# Altium schematic symbol library 调理电路板.SCHLIB: 432 symbols (part 3 of 8)
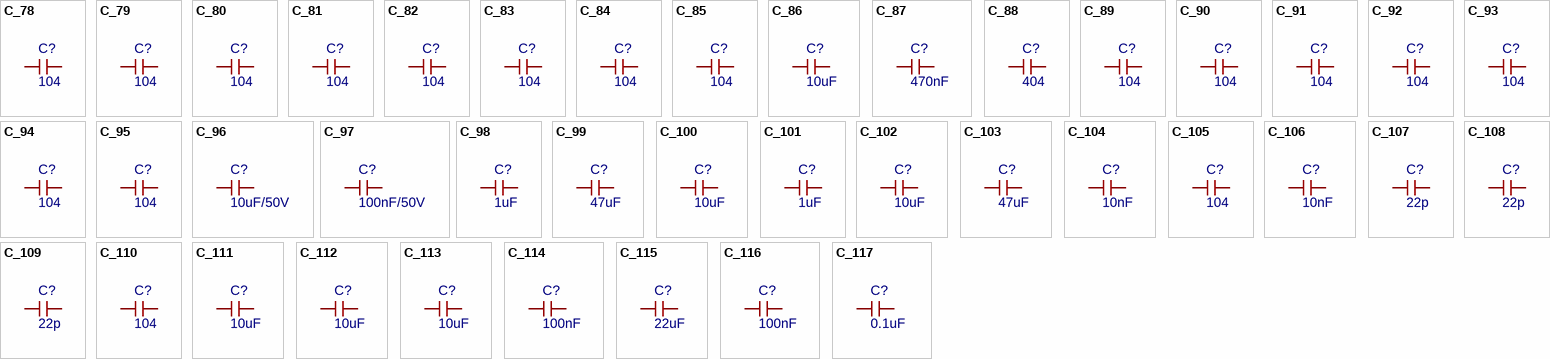
[diagram p12: symbols C_78 to C_117]

## C_107
designator C?, comment 22p
贴片电容; Device: C; BOM名称: 无极性贴片电容; 淘宝ID: 封装库来自淘宝 ID：黄晶宝石; Origin Footprint: C 0201_L; OriginFootprint 2: C 0402_L; OriginFootprint 3: C 0805_L; OriginFootprint 4: C 1206_L; OriginFootprint 5: C 1210_L; OriginFootprint 6: C 1808_L; OriginFootprint 7: C 1812_L; OriginFootprint 8: C 1825_L; OriginFootprint 9: C 2225_L; OriginFootprint 10: C 0201_M; OriginFootprint 11: C 0402_M; OriginFootprint 12: C 0603_M; OriginFootprint 13: C 0805_M; OriginFootprint 14: C 1206_M; OriginFootprint 15: C 1210_M; OriginFootprint 16: C 1808_M; OriginFootprint 17: C 1812_M; OriginFootprint 18: C 1825_M; OriginFootprint 19: C 2225_M; AddInBom: yes; OriginModelName: C 0603; 联系售后，技术支持: https://shop463601444.taobao.com; 唯一出售店铺网址: https://shop463601444.taobao.com; DesignItemID: C; LibraryName: 0.1 - 电阻-电容-电感; Symbol: C; FootprintName: C 0603_L
footprint C 0603_L
pins: 1, 2

## C_108
designator C?, comment 22p
贴片电容; Device: C; BOM名称: 无极性贴片电容; 淘宝ID: 封装库来自淘宝 ID：黄晶宝石; Origin Footprint: C 0201_L; OriginFootprint 2: C 0402_L; OriginFootprint 3: C 0805_L; OriginFootprint 4: C 1206_L; OriginFootprint 5: C 1210_L; OriginFootprint 6: C 1808_L; OriginFootprint 7: C 1812_L; OriginFootprint 8: C 1825_L; OriginFootprint 9: C 2225_L; OriginFootprint 10: C 0201_M; OriginFootprint 11: C 0402_M; OriginFootprint 12: C 0603_M; OriginFootprint 13: C 0805_M; OriginFootprint 14: C 1206_M; OriginFootprint 15: C 1210_M; OriginFootprint 16: C 1808_M; OriginFootprint 17: C 1812_M; OriginFootprint 18: C 1825_M; OriginFootprint 19: C 2225_M; UniqueId: e499cbaf5d6886da; AddInBom: yes; OriginModelName: C 0603; 联系售后，技术支持: https://shop463601444.taobao.com; 唯一出售店铺网址: https://shop463601444.taobao.com; DesignItemID: C; LibraryName: 0.1 - 电阻-电容-电感; SymbolName: C; FootprintName: C 0603_L
footprint C 0603_L
pins: 1, 2

## C_109
designator C?, comment 22p
贴片电容; Device: C; BOM名称: 无极性贴片电容; 淘宝ID: 封装库来自淘宝 ID：黄晶宝石; Origin Footprint: C 0201_L; OriginFootprint 2: C 0402_L; OriginFootprint 3: C 0805_L; OriginFootprint 4: C 1206_L; OriginFootprint 5: C 1210_L; OriginFootprint 6: C 1808_L; OriginFootprint 7: C 1812_L; OriginFootprint 8: C 1825_L; OriginFootprint 9: C 2225_L; OriginFootprint 10: C 0201_M; OriginFootprint 11: C 0402_M; OriginFootprint 12: C 0603_M; OriginFootprint 13: C 0805_M; OriginFootprint 14: C 1206_M; OriginFootprint 15: C 1210_M; OriginFootprint 16: C 1808_M; OriginFootprint 17: C 1812_M; OriginFootprint 18: C 1825_M; OriginFootprint 19: C 2225_M; UniqueId: 44783e19f4d5cd3c; AddInBom: yes; OriginModelName: C 0603; 联系售后，技术支持: https://shop463601444.taobao.com; 唯一出售店铺网址: https://shop463601444.taobao.com; DesignItemID: C; LibraryName: 0.1 - 电阻-电容-电感; SymbolName: C; FootprintName: C 0603_L
footprint C 0603_L
pins: 1, 2

## C_110
designator C?, comment 104
贴片电容; Device: C; BOM名称: 无极性贴片电容; 淘宝ID: 封装库来自淘宝 ID：黄晶宝石; Origin Footprint: C 0201_L; OriginFootprint 2: C 0402_L; OriginFootprint 3: C 0805_L; OriginFootprint 4: C 1206_L; OriginFootprint 5: C 1210_L; OriginFootprint 6: C 1808_L; OriginFootprint 7: C 1812_L; OriginFootprint 8: C 1825_L; OriginFootprint 9: C 2225_L; OriginFootprint 10: C 0201_M; OriginFootprint 11: C 0402_M; OriginFootprint 12: C 0603_M; OriginFootprint 13: C 0805_M; OriginFootprint 14: C 1206_M; OriginFootprint 15: C 1210_M; OriginFootprint 16: C 1808_M; OriginFootprint 17: C 1812_M; OriginFootprint 18: C 1825_M; OriginFootprint 19: C 2225_M; AddInBom: yes; OriginModelName: C 0603; 联系售后，技术支持: https://shop463601444.taobao.com; 唯一出售店铺网址: https://shop463601444.taobao.com; DesignItemID: C; LibraryName: 0.1 - 电阻-电容-电感; Symbol: C; FootprintName: C 0603_L
footprint C 0603_L
pins: 1, 2

## C_111
designator C?, comment 10uF
贴片电容; Device: C; BOM名称: 无极性贴片电容; 淘宝ID: 封装库来自淘宝 ID：黄晶宝石; Origin Footprint: C 0201_L; OriginFootprint 2: C 0402_L; OriginFootprint 3: C 0805_L; OriginFootprint 4: C 1206_L; OriginFootprint 5: C 1210_L; OriginFootprint 6: C 1808_L; OriginFootprint 7: C 1812_L; OriginFootprint 8: C 1825_L; OriginFootprint 9: C 2225_L; OriginFootprint 10: C 0201_M; OriginFootprint 11: C 0402_M; OriginFootprint 12: C 0603_M; OriginFootprint 13: C 0805_M; OriginFootprint 14: C 1206_M; OriginFootprint 15: C 1210_M; OriginFootprint 16: C 1808_M; OriginFootprint 17: C 1812_M; OriginFootprint 18: C 1825_M; OriginFootprint 19: C 2225_M; UniqueId: 9f98958e25b8e40a; AddInBom: yes; OriginModelName: C 0603; 联系售后，技术支持: https://shop463601444.taobao.com; 唯一出售店铺网址: https://shop463601444.taobao.com; DesignItemID: C; LibraryName: 0.1 - 电阻-电容-电感; SymbolName: C; FootprintName: C 0603_L
footprint C 0603_L
pins: 1, 2

## C_112
designator C?, comment 10uF
贴片电容; Device: C; BOM名称: 无极性贴片电容; 淘宝ID: 封装库来自淘宝 ID：黄晶宝石; Origin Footprint: C 0201_L; OriginFootprint 2: C 0402_L; OriginFootprint 3: C 0805_L; OriginFootprint 4: C 1206_L; OriginFootprint 5: C 1210_L; OriginFootprint 6: C 1808_L; OriginFootprint 7: C 1812_L; OriginFootprint 8: C 1825_L; OriginFootprint 9: C 2225_L; OriginFootprint 10: C 0201_M; OriginFootprint 11: C 0402_M; OriginFootprint 12: C 0603_M; OriginFootprint 13: C 0805_M; OriginFootprint 14: C 1206_M; OriginFootprint 15: C 1210_M; OriginFootprint 16: C 1808_M; OriginFootprint 17: C 1812_M; OriginFootprint 18: C 1825_M; OriginFootprint 19: C 2225_M; UniqueId: a1d489a10d49980a; AddInBom: yes; OriginModelName: C 0603; 联系售后，技术支持: https://shop463601444.taobao.com; 唯一出售店铺网址: https://shop463601444.taobao.com; DesignItemID: C; LibraryName: 0.1 - 电阻-电容-电感; SymbolName: C; FootprintName: C 0603_L
footprint C 0603_L
pins: 1, 2

## C_113
designator C?, comment 10uF
贴片电容; Device: C; BOM名称: 无极性贴片电容; 淘宝ID: 封装库来自淘宝 ID：黄晶宝石; Origin Footprint: C 0201_L; OriginFootprint 2: C 0402_L; OriginFootprint 3: C 0805_L; OriginFootprint 4: C 1206_L; OriginFootprint 5: C 1210_L; OriginFootprint 6: C 1808_L; OriginFootprint 7: C 1812_L; OriginFootprint 8: C 1825_L; OriginFootprint 9: C 2225_L; OriginFootprint 10: C 0201_M; OriginFootprint 11: C 0402_M; OriginFootprint 12: C 0603_M; OriginFootprint 13: C 0805_M; OriginFootprint 14: C 1206_M; OriginFootprint 15: C 1210_M; OriginFootprint 16: C 1808_M; OriginFootprint 17: C 1812_M; OriginFootprint 18: C 1825_M; OriginFootprint 19: C 2225_M; UniqueId: 824abd34b9a494cf; AddInBom: yes; OriginModelName: C 0603; 联系售后，技术支持: https://shop463601444.taobao.com; 唯一出售店铺网址: https://shop463601444.taobao.com; DesignItemID: C; LibraryName: 0.1 - 电阻-电容-电感; SymbolName: C; FootprintName: C 0603_L
footprint C 0603_L
pins: 1, 2

## C_114
designator C?, comment 100nF
贴片电容; Device: C; BOM名称: 无极性贴片电容; 淘宝ID: 封装库来自淘宝 ID：黄晶宝石; Origin Footprint: C 0201_L; OriginFootprint 2: C 0402_L; OriginFootprint 3: C 0805_L; OriginFootprint 4: C 1206_L; OriginFootprint 5: C 1210_L; OriginFootprint 6: C 1808_L; OriginFootprint 7: C 1812_L; OriginFootprint 8: C 1825_L; OriginFootprint 9: C 2225_L; OriginFootprint 10: C 0201_M; OriginFootprint 11: C 0402_M; OriginFootprint 12: C 0603_M; OriginFootprint 13: C 0805_M; OriginFootprint 14: C 1206_M; OriginFootprint 15: C 1210_M; OriginFootprint 16: C 1808_M; OriginFootprint 17: C 1812_M; OriginFootprint 18: C 1825_M; OriginFootprint 19: C 2225_M; UniqueId: 3b64af110c352242; AddInBom: yes; OriginModelName: C 0603; 联系售后，技术支持: https://shop463601444.taobao.com; 唯一出售店铺网址: https://shop463601444.taobao.com; DesignItemID: C; LibraryName: 0.1 - 电阻-电容-电感; SymbolName: C; FootprintName: C 0603_L
footprint C 0603_L
pins: 1, 2

## C_115
designator C?, comment 22uF
贴片电容; Device: C; BOM名称: 无极性贴片电容; 淘宝ID: 封装库来自淘宝 ID：黄晶宝石; Origin Footprint: C 0201_L; OriginFootprint 2: C 0402_L; OriginFootprint 3: C 0805_L; OriginFootprint 4: C 1206_L; OriginFootprint 5: C 1210_L; OriginFootprint 6: C 1808_L; OriginFootprint 7: C 1812_L; OriginFootprint 8: C 1825_L; OriginFootprint 9: C 2225_L; OriginFootprint 10: C 0201_M; OriginFootprint 11: C 0402_M; OriginFootprint 12: C 0603_M; OriginFootprint 13: C 0805_M; OriginFootprint 14: C 1206_M; OriginFootprint 15: C 1210_M; OriginFootprint 16: C 1808_M; OriginFootprint 17: C 1812_M; OriginFootprint 18: C 1825_M; OriginFootprint 19: C 2225_M; UniqueId: 6fbf0abcc055cd01; AddInBom: yes; OriginModelName: C 0603; 联系售后，技术支持: https://shop463601444.taobao.com; 唯一出售店铺网址: https://shop463601444.taobao.com; DesignItemID: C; LibraryName: 0.1 - 电阻-电容-电感; SymbolName: C; FootprintName: C 0603_L
footprint C 0603_L
pins: 1, 2

## C_116
designator C?, comment 100nF
贴片电容; Device: C; BOM名称: 无极性贴片电容; 淘宝ID: 封装库来自淘宝 ID：黄晶宝石; Origin Footprint: C 0201_L; OriginFootprint 2: C 0402_L; OriginFootprint 3: C 0805_L; OriginFootprint 4: C 1206_L; OriginFootprint 5: C 1210_L; OriginFootprint 6: C 1808_L; OriginFootprint 7: C 1812_L; OriginFootprint 8: C 1825_L; OriginFootprint 9: C 2225_L; OriginFootprint 10: C 0201_M; OriginFootprint 11: C 0402_M; OriginFootprint 12: C 0603_M; OriginFootprint 13: C 0805_M; OriginFootprint 14: C 1206_M; OriginFootprint 15: C 1210_M; OriginFootprint 16: C 1808_M; OriginFootprint 17: C 1812_M; OriginFootprint 18: C 1825_M; OriginFootprint 19: C 2225_M; UniqueId: 0051e2e57f65e1ac; AddInBom: yes; OriginModelName: C 0603; 联系售后，技术支持: https://shop463601444.taobao.com; 唯一出售店铺网址: https://shop463601444.taobao.com; DesignItemID: C; LibraryName: 0.1 - 电阻-电容-电感; SymbolName: C; FootprintName: C 0603_L
footprint C 0603_L
pins: 1, 2

## C_117
designator C?, comment 0.1uF
贴片电容; Device: C; BOM名称: 无极性贴片电容; 淘宝ID: 封装库来自淘宝 ID：黄晶宝石; Origin Footprint: C 0201_L; OriginFootprint 2: C 0402_L; OriginFootprint 3: C 0805_L; OriginFootprint 4: C 1206_L; OriginFootprint 5: C 1210_L; OriginFootprint 6: C 1808_L; OriginFootprint 7: C 1812_L; OriginFootprint 8: C 1825_L; OriginFootprint 9: C 2225_L; OriginFootprint 10: C 0201_M; OriginFootprint 11: C 0402_M; OriginFootprint 12: C 0603_M; OriginFootprint 13: C 0805_M; OriginFootprint 14: C 1206_M; OriginFootprint 15: C 1210_M; OriginFootprint 16: C 1808_M; OriginFootprint 17: C 1812_M; OriginFootprint 18: C 1825_M; OriginFootprint 19: C 2225_M; UniqueId: c0e8232d23165c04; AddInBom: yes; OriginModelName: C 0603; 联系售后，技术支持: https://shop463601444.taobao.com; 唯一出售店铺网址: https://shop463601444.taobao.com; DesignItemID: C; LibraryName: 0.1 - 电阻-电容-电感; SymbolName: C; FootprintName: C 0603_L
footprint C 0603_L
pins: 1, 2

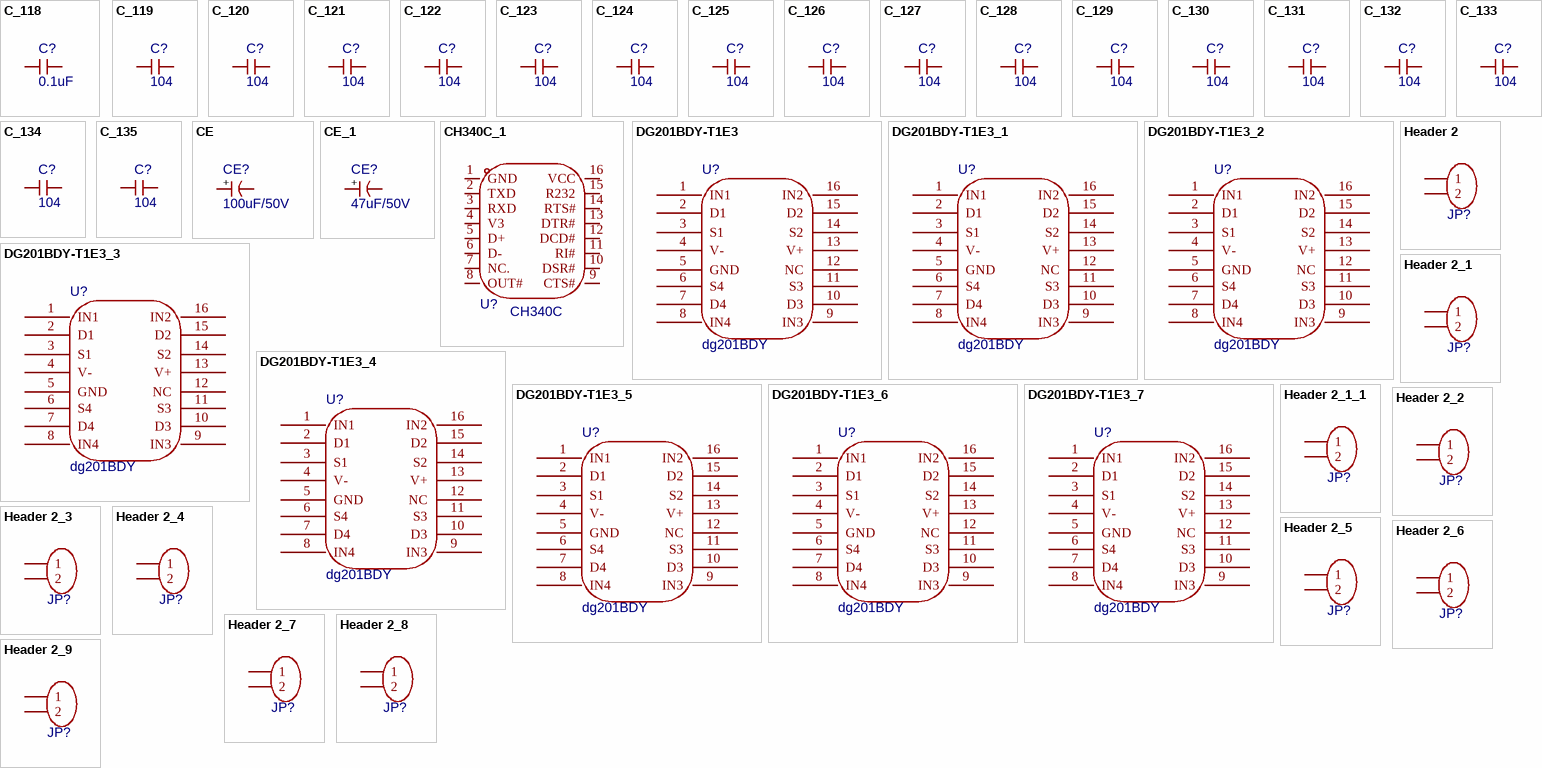
[diagram p3: symbols C_118 to Header 2_9]

## C_118
designator C?, comment 0.1uF
贴片电容; Device: C; BOM名称: 无极性贴片电容; 淘宝ID: 封装库来自淘宝 ID：黄晶宝石; Origin Footprint: C 0201_L; OriginFootprint 2: C 0402_L; OriginFootprint 3: C 0805_L; OriginFootprint 4: C 1206_L; OriginFootprint 5: C 1210_L; OriginFootprint 6: C 1808_L; OriginFootprint 7: C 1812_L; OriginFootprint 8: C 1825_L; OriginFootprint 9: C 2225_L; OriginFootprint 10: C 0201_M; OriginFootprint 11: C 0402_M; OriginFootprint 12: C 0603_M; OriginFootprint 13: C 0805_M; OriginFootprint 14: C 1206_M; OriginFootprint 15: C 1210_M; OriginFootprint 16: C 1808_M; OriginFootprint 17: C 1812_M; OriginFootprint 18: C 1825_M; OriginFootprint 19: C 2225_M; UniqueId: c782c298b34552c5; AddInBom: yes; OriginModelName: C 0603; 联系售后，技术支持: https://shop463601444.taobao.com; 唯一出售店铺网址: https://shop463601444.taobao.com; DesignItemID: C; LibraryName: 0.1 - 电阻-电容-电感; SymbolName: C; FootprintName: C 0603_L
footprint C 0603_L
pins: 1, 2

## C_119
designator C?, comment 104
贴片电容; Device: C; BOM名称: 无极性贴片电容; 淘宝ID: 封装库来自淘宝 ID：黄晶宝石; Origin Footprint: C 0201_L; OriginFootprint 2: C 0402_L; OriginFootprint 3: C 0805_L; OriginFootprint 4: C 1206_L; OriginFootprint 5: C 1210_L; OriginFootprint 6: C 1808_L; OriginFootprint 7: C 1812_L; OriginFootprint 8: C 1825_L; OriginFootprint 9: C 2225_L; OriginFootprint 10: C 0201_M; OriginFootprint 11: C 0402_M; OriginFootprint 12: C 0603_M; OriginFootprint 13: C 0805_M; OriginFootprint 14: C 1206_M; OriginFootprint 15: C 1210_M; OriginFootprint 16: C 1808_M; OriginFootprint 17: C 1812_M; OriginFootprint 18: C 1825_M; OriginFootprint 19: C 2225_M; UniqueId: 09d5d64189419707; AddInBom: yes; OriginModelName: C 0603; 联系售后，技术支持: https://shop463601444.taobao.com; 唯一出售店铺网址: https://shop463601444.taobao.com; DesignItemID: C; LibraryName: 0.1 - 电阻-电容-电感; SymbolName: C; FootprintName: C 0603_L
footprint C 0603_L
pins: 1, 2

## C_120
designator C?, comment 104
贴片电容; Device: C; BOM名称: 无极性贴片电容; 淘宝ID: 封装库来自淘宝 ID：黄晶宝石; Origin Footprint: C 0201_L; OriginFootprint 2: C 0402_L; OriginFootprint 3: C 0805_L; OriginFootprint 4: C 1206_L; OriginFootprint 5: C 1210_L; OriginFootprint 6: C 1808_L; OriginFootprint 7: C 1812_L; OriginFootprint 8: C 1825_L; OriginFootprint 9: C 2225_L; OriginFootprint 10: C 0201_M; OriginFootprint 11: C 0402_M; OriginFootprint 12: C 0603_M; OriginFootprint 13: C 0805_M; OriginFootprint 14: C 1206_M; OriginFootprint 15: C 1210_M; OriginFootprint 16: C 1808_M; OriginFootprint 17: C 1812_M; OriginFootprint 18: C 1825_M; OriginFootprint 19: C 2225_M; UniqueId: a4fa6dbd8546cc48; AddInBom: yes; OriginModelName: C 0603; 联系售后，技术支持: https://shop463601444.taobao.com; 唯一出售店铺网址: https://shop463601444.taobao.com; DesignItemID: C; LibraryName: 0.1 - 电阻-电容-电感; SymbolName: C; FootprintName: C 0603_L
footprint C 0603_L
pins: 1, 2

## C_121
designator C?, comment 104
贴片电容; Device: C; BOM名称: 无极性贴片电容; 淘宝ID: 封装库来自淘宝 ID：黄晶宝石; Origin Footprint: C 0201_L; OriginFootprint 2: C 0402_L; OriginFootprint 3: C 0805_L; OriginFootprint 4: C 1206_L; OriginFootprint 5: C 1210_L; OriginFootprint 6: C 1808_L; OriginFootprint 7: C 1812_L; OriginFootprint 8: C 1825_L; OriginFootprint 9: C 2225_L; OriginFootprint 10: C 0201_M; OriginFootprint 11: C 0402_M; OriginFootprint 12: C 0603_M; OriginFootprint 13: C 0805_M; OriginFootprint 14: C 1206_M; OriginFootprint 15: C 1210_M; OriginFootprint 16: C 1808_M; OriginFootprint 17: C 1812_M; OriginFootprint 18: C 1825_M; OriginFootprint 19: C 2225_M; UniqueId: 5298304991856aac; AddInBom: yes; OriginModelName: C 0603; 联系售后，技术支持: https://shop463601444.taobao.com; 唯一出售店铺网址: https://shop463601444.taobao.com; DesignItemID: C; LibraryName: 0.1 - 电阻-电容-电感; SymbolName: C; FootprintName: C 0603_L
footprint C 0603_L
pins: 1, 2

## C_122
designator C?, comment 104
贴片电容; Device: C; BOM名称: 无极性贴片电容; 淘宝ID: 封装库来自淘宝 ID：黄晶宝石; Origin Footprint: C 0201_L; OriginFootprint 2: C 0402_L; OriginFootprint 3: C 0805_L; OriginFootprint 4: C 1206_L; OriginFootprint 5: C 1210_L; OriginFootprint 6: C 1808_L; OriginFootprint 7: C 1812_L; OriginFootprint 8: C 1825_L; OriginFootprint 9: C 2225_L; OriginFootprint 10: C 0201_M; OriginFootprint 11: C 0402_M; OriginFootprint 12: C 0603_M; OriginFootprint 13: C 0805_M; OriginFootprint 14: C 1206_M; OriginFootprint 15: C 1210_M; OriginFootprint 16: C 1808_M; OriginFootprint 17: C 1812_M; OriginFootprint 18: C 1825_M; OriginFootprint 19: C 2225_M; UniqueId: cd91d26fa4917fbf; AddInBom: yes; OriginModelName: C 0603; 联系售后，技术支持: https://shop463601444.taobao.com; 唯一出售店铺网址: https://shop463601444.taobao.com; DesignItemID: C; LibraryName: 0.1 - 电阻-电容-电感; SymbolName: C; FootprintName: C 0603_L
footprint C 0603_L
pins: 1, 2

## C_123
designator C?, comment 104
贴片电容; Device: C; BOM名称: 无极性贴片电容; 淘宝ID: 封装库来自淘宝 ID：黄晶宝石; Origin Footprint: C 0201_L; OriginFootprint 2: C 0402_L; OriginFootprint 3: C 0805_L; OriginFootprint 4: C 1206_L; OriginFootprint 5: C 1210_L; OriginFootprint 6: C 1808_L; OriginFootprint 7: C 1812_L; OriginFootprint 8: C 1825_L; OriginFootprint 9: C 2225_L; OriginFootprint 10: C 0201_M; OriginFootprint 11: C 0402_M; OriginFootprint 12: C 0603_M; OriginFootprint 13: C 0805_M; OriginFootprint 14: C 1206_M; OriginFootprint 15: C 1210_M; OriginFootprint 16: C 1808_M; OriginFootprint 17: C 1812_M; OriginFootprint 18: C 1825_M; OriginFootprint 19: C 2225_M; UniqueId: e068690e94c157bc; AddInBom: yes; OriginModelName: C 0603; 联系售后，技术支持: https://shop463601444.taobao.com; 唯一出售店铺网址: https://shop463601444.taobao.com; DesignItemID: C; LibraryName: 0.1 - 电阻-电容-电感; SymbolName: C; FootprintName: C 0603_L
footprint C 0603_L
pins: 1, 2

## C_124
designator C?, comment 104
贴片电容; Device: C; BOM名称: 无极性贴片电容; 淘宝ID: 封装库来自淘宝 ID：黄晶宝石; Origin Footprint: C 0201_L; OriginFootprint 2: C 0402_L; OriginFootprint 3: C 0805_L; OriginFootprint 4: C 1206_L; OriginFootprint 5: C 1210_L; OriginFootprint 6: C 1808_L; OriginFootprint 7: C 1812_L; OriginFootprint 8: C 1825_L; OriginFootprint 9: C 2225_L; OriginFootprint 10: C 0201_M; OriginFootprint 11: C 0402_M; OriginFootprint 12: C 0603_M; OriginFootprint 13: C 0805_M; OriginFootprint 14: C 1206_M; OriginFootprint 15: C 1210_M; OriginFootprint 16: C 1808_M; OriginFootprint 17: C 1812_M; OriginFootprint 18: C 1825_M; OriginFootprint 19: C 2225_M; UniqueId: 60b913fe2234996d; AddInBom: yes; OriginModelName: C 0603; 联系售后，技术支持: https://shop463601444.taobao.com; 唯一出售店铺网址: https://shop463601444.taobao.com; DesignItemID: C; LibraryName: 0.1 - 电阻-电容-电感; SymbolName: C; FootprintName: C 0603_L
footprint C 0603_L
pins: 1, 2

## C_125
designator C?, comment 104
贴片电容; Device: C; BOM名称: 无极性贴片电容; 淘宝ID: 封装库来自淘宝 ID：黄晶宝石; Origin Footprint: C 0201_L; OriginFootprint 2: C 0402_L; OriginFootprint 3: C 0805_L; OriginFootprint 4: C 1206_L; OriginFootprint 5: C 1210_L; OriginFootprint 6: C 1808_L; OriginFootprint 7: C 1812_L; OriginFootprint 8: C 1825_L; OriginFootprint 9: C 2225_L; OriginFootprint 10: C 0201_M; OriginFootprint 11: C 0402_M; OriginFootprint 12: C 0603_M; OriginFootprint 13: C 0805_M; OriginFootprint 14: C 1206_M; OriginFootprint 15: C 1210_M; OriginFootprint 16: C 1808_M; OriginFootprint 17: C 1812_M; OriginFootprint 18: C 1825_M; OriginFootprint 19: C 2225_M; UniqueId: 485846f0059d8f41; AddInBom: yes; OriginModelName: C 0603; 联系售后，技术支持: https://shop463601444.taobao.com; 唯一出售店铺网址: https://shop463601444.taobao.com; DesignItemID: C; LibraryName: 0.1 - 电阻-电容-电感; SymbolName: C; FootprintName: C 0603_L
footprint C 0603_L
pins: 1, 2

## C_126
designator C?, comment 104
贴片电容; Device: C; BOM名称: 无极性贴片电容; 淘宝ID: 封装库来自淘宝 ID：黄晶宝石; Origin Footprint: C 0201_L; OriginFootprint 2: C 0402_L; OriginFootprint 3: C 0805_L; OriginFootprint 4: C 1206_L; OriginFootprint 5: C 1210_L; OriginFootprint 6: C 1808_L; OriginFootprint 7: C 1812_L; OriginFootprint 8: C 1825_L; OriginFootprint 9: C 2225_L; OriginFootprint 10: C 0201_M; OriginFootprint 11: C 0402_M; OriginFootprint 12: C 0603_M; OriginFootprint 13: C 0805_M; OriginFootprint 14: C 1206_M; OriginFootprint 15: C 1210_M; OriginFootprint 16: C 1808_M; OriginFootprint 17: C 1812_M; OriginFootprint 18: C 1825_M; OriginFootprint 19: C 2225_M; UniqueId: 7c578440d25b8116; AddInBom: yes; OriginModelName: C 0603; 联系售后，技术支持: https://shop463601444.taobao.com; 唯一出售店铺网址: https://shop463601444.taobao.com; DesignItemID: C; LibraryName: 0.1 - 电阻-电容-电感; SymbolName: C; FootprintName: C 0603_L
footprint C 0603_L
pins: 1, 2

## C_127
designator C?, comment 104
贴片电容; Device: C; BOM名称: 无极性贴片电容; 淘宝ID: 封装库来自淘宝 ID：黄晶宝石; Origin Footprint: C 0201_L; OriginFootprint 2: C 0402_L; OriginFootprint 3: C 0805_L; OriginFootprint 4: C 1206_L; OriginFootprint 5: C 1210_L; OriginFootprint 6: C 1808_L; OriginFootprint 7: C 1812_L; OriginFootprint 8: C 1825_L; OriginFootprint 9: C 2225_L; OriginFootprint 10: C 0201_M; OriginFootprint 11: C 0402_M; OriginFootprint 12: C 0603_M; OriginFootprint 13: C 0805_M; OriginFootprint 14: C 1206_M; OriginFootprint 15: C 1210_M; OriginFootprint 16: C 1808_M; OriginFootprint 17: C 1812_M; OriginFootprint 18: C 1825_M; OriginFootprint 19: C 2225_M; UniqueId: af7046427a4bfdfb; AddInBom: yes; OriginModelName: C 0603; 联系售后，技术支持: https://shop463601444.taobao.com; 唯一出售店铺网址: https://shop463601444.taobao.com; DesignItemID: C; LibraryName: 0.1 - 电阻-电容-电感; SymbolName: C; FootprintName: C 0603_L
footprint C 0603_L
pins: 1, 2

## C_128
designator C?, comment 104
贴片电容; Device: C; BOM名称: 无极性贴片电容; 淘宝ID: 封装库来自淘宝 ID：黄晶宝石; Origin Footprint: C 0201_L; OriginFootprint 2: C 0402_L; OriginFootprint 3: C 0805_L; OriginFootprint 4: C 1206_L; OriginFootprint 5: C 1210_L; OriginFootprint 6: C 1808_L; OriginFootprint 7: C 1812_L; OriginFootprint 8: C 1825_L; OriginFootprint 9: C 2225_L; OriginFootprint 10: C 0201_M; OriginFootprint 11: C 0402_M; OriginFootprint 12: C 0603_M; OriginFootprint 13: C 0805_M; OriginFootprint 14: C 1206_M; OriginFootprint 15: C 1210_M; OriginFootprint 16: C 1808_M; OriginFootprint 17: C 1812_M; OriginFootprint 18: C 1825_M; OriginFootprint 19: C 2225_M; UniqueId: 65328433fb04ddb7; AddInBom: yes; OriginModelName: C 0603; 联系售后，技术支持: https://shop463601444.taobao.com; 唯一出售店铺网址: https://shop463601444.taobao.com; DesignItemID: C; LibraryName: 0.1 - 电阻-电容-电感; SymbolName: C; FootprintName: C 0603_L
footprint C 0603_L
pins: 1, 2

## C_129
designator C?, comment 104
贴片电容; Device: C; BOM名称: 无极性贴片电容; 淘宝ID: 封装库来自淘宝 ID：黄晶宝石; Origin Footprint: C 0201_L; OriginFootprint 2: C 0402_L; OriginFootprint 3: C 0805_L; OriginFootprint 4: C 1206_L; OriginFootprint 5: C 1210_L; OriginFootprint 6: C 1808_L; OriginFootprint 7: C 1812_L; OriginFootprint 8: C 1825_L; OriginFootprint 9: C 2225_L; OriginFootprint 10: C 0201_M; OriginFootprint 11: C 0402_M; OriginFootprint 12: C 0603_M; OriginFootprint 13: C 0805_M; OriginFootprint 14: C 1206_M; OriginFootprint 15: C 1210_M; OriginFootprint 16: C 1808_M; OriginFootprint 17: C 1812_M; OriginFootprint 18: C 1825_M; OriginFootprint 19: C 2225_M; UniqueId: 9b91e7356bb9865f; AddInBom: yes; OriginModelName: C 0603; 联系售后，技术支持: https://shop463601444.taobao.com; 唯一出售店铺网址: https://shop463601444.taobao.com; DesignItemID: C; LibraryName: 0.1 - 电阻-电容-电感; SymbolName: C; FootprintName: C 0603_L
footprint C 0603_L
pins: 1, 2

## C_130
designator C?, comment 104
贴片电容; Device: C; BOM名称: 无极性贴片电容; 淘宝ID: 封装库来自淘宝 ID：黄晶宝石; Origin Footprint: C 0201_L; OriginFootprint 2: C 0402_L; OriginFootprint 3: C 0805_L; OriginFootprint 4: C 1206_L; OriginFootprint 5: C 1210_L; OriginFootprint 6: C 1808_L; OriginFootprint 7: C 1812_L; OriginFootprint 8: C 1825_L; OriginFootprint 9: C 2225_L; OriginFootprint 10: C 0201_M; OriginFootprint 11: C 0402_M; OriginFootprint 12: C 0603_M; OriginFootprint 13: C 0805_M; OriginFootprint 14: C 1206_M; OriginFootprint 15: C 1210_M; OriginFootprint 16: C 1808_M; OriginFootprint 17: C 1812_M; OriginFootprint 18: C 1825_M; OriginFootprint 19: C 2225_M; UniqueId: 4b556904310d1556; AddInBom: yes; OriginModelName: C 0603; 联系售后，技术支持: https://shop463601444.taobao.com; 唯一出售店铺网址: https://shop463601444.taobao.com; DesignItemID: C; LibraryName: 0.1 - 电阻-电容-电感; SymbolName: C; FootprintName: C 0603_L
footprint C 0603_L
pins: 1, 2

## C_131
designator C?, comment 104
贴片电容; Device: C; BOM名称: 无极性贴片电容; 淘宝ID: 封装库来自淘宝 ID：黄晶宝石; Origin Footprint: C 0201_L; OriginFootprint 2: C 0402_L; OriginFootprint 3: C 0805_L; OriginFootprint 4: C 1206_L; OriginFootprint 5: C 1210_L; OriginFootprint 6: C 1808_L; OriginFootprint 7: C 1812_L; OriginFootprint 8: C 1825_L; OriginFootprint 9: C 2225_L; OriginFootprint 10: C 0201_M; OriginFootprint 11: C 0402_M; OriginFootprint 12: C 0603_M; OriginFootprint 13: C 0805_M; OriginFootprint 14: C 1206_M; OriginFootprint 15: C 1210_M; OriginFootprint 16: C 1808_M; OriginFootprint 17: C 1812_M; OriginFootprint 18: C 1825_M; OriginFootprint 19: C 2225_M; UniqueId: cc82bf2c2e22e605; AddInBom: yes; OriginModelName: C 0603; 联系售后，技术支持: https://shop463601444.taobao.com; 唯一出售店铺网址: https://shop463601444.taobao.com; DesignItemID: C; LibraryName: 0.1 - 电阻-电容-电感; SymbolName: C; FootprintName: C 0603_L
footprint C 0603_L
pins: 1, 2

## C_132
designator C?, comment 104
贴片电容; Device: C; BOM名称: 无极性贴片电容; 淘宝ID: 封装库来自淘宝 ID：黄晶宝石; Origin Footprint: C 0201_L; OriginFootprint 2: C 0402_L; OriginFootprint 3: C 0805_L; OriginFootprint 4: C 1206_L; OriginFootprint 5: C 1210_L; OriginFootprint 6: C 1808_L; OriginFootprint 7: C 1812_L; OriginFootprint 8: C 1825_L; OriginFootprint 9: C 2225_L; OriginFootprint 10: C 0201_M; OriginFootprint 11: C 0402_M; OriginFootprint 12: C 0603_M; OriginFootprint 13: C 0805_M; OriginFootprint 14: C 1206_M; OriginFootprint 15: C 1210_M; OriginFootprint 16: C 1808_M; OriginFootprint 17: C 1812_M; OriginFootprint 18: C 1825_M; OriginFootprint 19: C 2225_M; UniqueId: ab4a8fe24fad9fe4; AddInBom: yes; OriginModelName: C 0603; 联系售后，技术支持: https://shop463601444.taobao.com; 唯一出售店铺网址: https://shop463601444.taobao.com; DesignItemID: C; LibraryName: 0.1 - 电阻-电容-电感; SymbolName: C; FootprintName: C 0603_L
footprint C 0603_L
pins: 1, 2

## C_133
designator C?, comment 104
贴片电容; Device: C; BOM名称: 无极性贴片电容; 淘宝ID: 封装库来自淘宝 ID：黄晶宝石; Origin Footprint: C 0201_L; OriginFootprint 2: C 0402_L; OriginFootprint 3: C 0805_L; OriginFootprint 4: C 1206_L; OriginFootprint 5: C 1210_L; OriginFootprint 6: C 1808_L; OriginFootprint 7: C 1812_L; OriginFootprint 8: C 1825_L; OriginFootprint 9: C 2225_L; OriginFootprint 10: C 0201_M; OriginFootprint 11: C 0402_M; OriginFootprint 12: C 0603_M; OriginFootprint 13: C 0805_M; OriginFootprint 14: C 1206_M; OriginFootprint 15: C 1210_M; OriginFootprint 16: C 1808_M; OriginFootprint 17: C 1812_M; OriginFootprint 18: C 1825_M; OriginFootprint 19: C 2225_M; UniqueId: deb55bbe20a101cf; AddInBom: yes; OriginModelName: C 0603; 联系售后，技术支持: https://shop463601444.taobao.com; 唯一出售店铺网址: https://shop463601444.taobao.com; DesignItemID: C; LibraryName: 0.1 - 电阻-电容-电感; SymbolName: C; FootprintName: C 0603_L
footprint C 0603_L
pins: 1, 2

## C_134
designator C?, comment 104
贴片电容; Device: C; BOM名称: 无极性贴片电容; 淘宝ID: 封装库来自淘宝 ID：黄晶宝石; Origin Footprint: C 0201_L; OriginFootprint 2: C 0402_L; OriginFootprint 3: C 0805_L; OriginFootprint 4: C 1206_L; OriginFootprint 5: C 1210_L; OriginFootprint 6: C 1808_L; OriginFootprint 7: C 1812_L; OriginFootprint 8: C 1825_L; OriginFootprint 9: C 2225_L; OriginFootprint 10: C 0201_M; OriginFootprint 11: C 0402_M; OriginFootprint 12: C 0603_M; OriginFootprint 13: C 0805_M; OriginFootprint 14: C 1206_M; OriginFootprint 15: C 1210_M; OriginFootprint 16: C 1808_M; OriginFootprint 17: C 1812_M; OriginFootprint 18: C 1825_M; OriginFootprint 19: C 2225_M; UniqueId: 6827ca7a6bd67e26; AddInBom: yes; OriginModelName: C 0603; 联系售后，技术支持: https://shop463601444.taobao.com; 唯一出售店铺网址: https://shop463601444.taobao.com; DesignItemID: C; LibraryName: 0.1 - 电阻-电容-电感; SymbolName: C; FootprintName: C 0603_L
footprint C 0603_L
pins: 1, 2

## C_135
designator C?, comment 104
贴片电容; Device: C; BOM名称: 无极性贴片电容; 淘宝ID: 封装库来自淘宝 ID：黄晶宝石; Origin Footprint: C 0201_L; OriginFootprint 2: C 0402_L; OriginFootprint 3: C 0805_L; OriginFootprint 4: C 1206_L; OriginFootprint 5: C 1210_L; OriginFootprint 6: C 1808_L; OriginFootprint 7: C 1812_L; OriginFootprint 8: C 1825_L; OriginFootprint 9: C 2225_L; OriginFootprint 10: C 0201_M; OriginFootprint 11: C 0402_M; OriginFootprint 12: C 0603_M; OriginFootprint 13: C 0805_M; OriginFootprint 14: C 1206_M; OriginFootprint 15: C 1210_M; OriginFootprint 16: C 1808_M; OriginFootprint 17: C 1812_M; OriginFootprint 18: C 1825_M; OriginFootprint 19: C 2225_M; UniqueId: bdf2686215596067; AddInBom: yes; OriginModelName: C 0603; 联系售后，技术支持: https://shop463601444.taobao.com; 唯一出售店铺网址: https://shop463601444.taobao.com; DesignItemID: C; LibraryName: 0.1 - 电阻-电容-电感; SymbolName: C; FootprintName: C 0603_L
footprint C 0603_L
pins: 1, 2

## CE
designator CE?, comment 100uF/50V
直插电解电容; Device: CE; 淘宝ID: 封装库来自淘宝 ID：黄晶宝石; Origin Footprint: CAP 1.5*4*8; OriginFootprint 2: CAP 1.5*4*8 - BK; OriginFootprint 3: CAP 1.5*4*8 - GD; OriginFootprint 4: CAP 1.5*4*8-H; OriginFootprint 5: CAP 1.5*4*8-H - BK; OriginFootprint 6: CAP 1.5*4*8-H - GD; OriginFootprint 7: CAP 2.0*5*11; OriginFootprint 8: CAP 2.0*5*11 - BK; OriginFootprint 9: CAP 2.0*5*11 - GD; OriginFootprint 10: CAP 2.0*5*11-H; OriginFootprint 11: CAP 2.0*5*11-H - BK; OriginFootprint 12: CAP 2.0*5*11-H - GD; OriginFootprint 13: CAP 2.5*5*11; OriginFootprint 14: CAP 2.5*5*11 - BK; OriginFootprint 15: CAP 2.5*5*11 - GD; OriginFootprint 16: CAP 2.5*5*11-H; OriginFootprint 17: CAP 2.5*5*11-H - BK; OriginFootprint 18: CAP 2.5*5*11-H - GD; OriginFootprint 19: CAP 2.5*6.3*7; OriginFootprint 20: CAP 2.5*6.3*7 - BK; OriginFootprint 21: CAP 2.5*6.3*7 - GD; OriginFootprint 22: CAP 2.5*6.3*7-H; OriginFootprint 23: CAP 2.5*6.3*7-H - BK; OriginFootprint 24: CAP 2.5*6.3*7-H - GD; OriginFootprint 25: CAP 2.5*6.3*11.2; OriginFootprint 26: CAP 2.5*6.3*11.2 - BK; OriginFootprint 27: CAP 2.5*6.3*11.2 - GD; OriginFootprint 28: CAP 2.5*6.3*11.2-H; OriginFootprint 29: CAP 2.5*6.3*11.2-H - BK; OriginFootprint 30: CAP 2.5*6.3*11.2-H - GD; OriginFootprint 31: CAP 3.5*8*11.5 - BK; OriginFootprint 32: CAP 3.5*8*11.5 - GD; OriginFootprint 33: CAP 3.5*8*11.5-H; OriginFootprint 34: CAP 3.5*8*11.5-H - BK; OriginFootprint 35: CAP 3.5*8*11.5-H - GD; OriginFootprint 36: CAP 5.0*10*12.5; OriginFootprint 37: CAP 5.0*10*12.5 - BK; OriginFootprint 38: CAP 5.0*10*12.5 - GD; OriginFootprint 39: CAP 5.0*10*12.5-H; OriginFootprint 40: CAP 5.0*10*12.5-H - BK; OriginFootprint 41: CAP 5.0*10*12.5-H - GD; OriginFootprint 42: CAP 5.0*10*16; OriginFootprint 43: CAP 5.0*10*16 - BK; OriginFootprint 44: CAP 5.0*10*16 - GD; OriginFootprint 45: CAP 5.0*10*16-H; OriginFootprint 46: CAP 5.0*10*16-H - BK; OriginFootprint 47: CAP 5.0*10*16-H - GD; OriginFootprint 48: CAP 5.0*10*20; OriginFootprint 49: CAP 5.0*10*20 - BK; OriginFootprint 50: CAP 5.0*10*20 - GD; OriginFootprint 51: CAP 5.0*10*20-H; OriginFootprint 52: CAP 5.0*10*20-H - BK; OriginFootprint 53: CAP 5.0*10*20-H - GD; OriginFootprint 54: CAP 5.0*12.5*20; OriginFootprint 55: CAP 5.0*12.5*20 - BK; OriginFootprint 56: CAP 5.0*12.5*20 - GD; OriginFootprint 57: CAP 5.0*12.5*20-H; OriginFootprint 58: CAP 5.0*12.5*20-H - BK; OriginFootprint 59: CAP 5.0*12.5*20-H - GD; OriginFootprint 60: CAP 5.0*12.5*25; OriginFootprint 61: CAP 5.0*12.5*25 - BK; OriginFootprint 62: CAP 5.0*12.5*25 - GD; OriginFootprint 63: CAP 5.0*12.5*25-H; OriginFootprint 64: CAP 5.0*12.5*25-H - BK; OriginFootprint 65: CAP 5.0*12.5*25-H - GD; OriginFootprint 66: CAP 7.5*16*25; OriginFootprint 67: CAP 7.5*16*25 - BK; OriginFootprint 68: CAP 7.5*16*25 - GD; OriginFootprint 69: CAP 7.5*16*25-H; OriginFootprint 70: CAP 7.5*16*25-H - BK; OriginFootprint 71: CAP 7.5*16*25-H - GD; OriginFootprint 72: CAP 7.5*16*31.5; OriginFootprint 73: CAP 7.5*16*31.5 - BK; OriginFootprint 74: CAP 7.5*16*31.5 - GD; OriginFootprint 75: CAP 7.5*16*31.5-H; OriginFootprint 76: CAP 7.5*16*31.5-H - BK; OriginFootprint 77: CAP 7.5*16*31.5-H - GD; OriginFootprint 78: CAP 7.5*18*35.5; OriginFootprint 79: CAP 7.5*18*35.5 - BK; OriginFootprint 80: CAP 7.5*18*35.5 - GD; OriginFootprint 81: CAP 7.5*18*35.5-H; OriginFootprint 82: CAP 7.5*18*35.5-H - BK; OriginFootprint 83: CAP 7.5*18*35.5-H - GD; OriginFootprint 84: CAP 10*22*31.5; OriginFootprint 85: CAP 10*22*31.5 - BK; OriginFootprint 86: CAP 10*22*31.5 - GD; OriginFootprint 87: CAP 10*22*40; OriginFootprint 88: CAP 10*22*40 - BK; OriginFootprint 89: CAP 10*22*40 - GD; UniqueId: 695705dba914cf0e; AddInBom: yes; OriginModelName: CAP 3.5X8X11.5; BOM名称: 直插电解电容; 联系售后: https://shop463601444.taobao.com; DesignItemID: CE; LibraryName: 0.1 - 电阻-电容-电感; SymbolName: CE; FootprintName: CAP 3.5*8*11.5
footprint CAP 3.5*8*11.5
pins: 1 A, 2 K
text: +

## CE_1
designator CE?, comment 47uF/50V
直插电解电容; Device: CE_1; 淘宝ID: 封装库来自淘宝 ID：黄晶宝石; Origin Footprint: CAP 1.5*4*8; OriginFootprint 2: CAP 1.5*4*8 - BK; OriginFootprint 3: CAP 1.5*4*8 - GD; OriginFootprint 4: CAP 1.5*4*8-H; OriginFootprint 5: CAP 1.5*4*8-H - BK; OriginFootprint 6: CAP 1.5*4*8-H - GD; OriginFootprint 7: CAP 2.0*5*11; OriginFootprint 8: CAP 2.0*5*11 - BK; OriginFootprint 9: CAP 2.0*5*11 - GD; OriginFootprint 10: CAP 2.0*5*11-H; OriginFootprint 11: CAP 2.0*5*11-H - BK; OriginFootprint 12: CAP 2.0*5*11-H - GD; OriginFootprint 13: CAP 2.5*5*11; OriginFootprint 14: CAP 2.5*5*11 - BK; OriginFootprint 15: CAP 2.5*5*11 - GD; OriginFootprint 16: CAP 2.5*5*11-H; OriginFootprint 17: CAP 2.5*5*11-H - BK; OriginFootprint 18: CAP 2.5*5*11-H - GD; OriginFootprint 19: CAP 2.5*6.3*7; OriginFootprint 20: CAP 2.5*6.3*7 - BK; OriginFootprint 21: CAP 2.5*6.3*7 - GD; OriginFootprint 22: CAP 2.5*6.3*7-H; OriginFootprint 23: CAP 2.5*6.3*7-H - BK; OriginFootprint 24: CAP 2.5*6.3*7-H - GD; OriginFootprint 25: CAP 2.5*6.3*11.2 - BK; OriginFootprint 26: CAP 2.5*6.3*11.2 - GD; OriginFootprint 27: CAP 2.5*6.3*11.2-H; OriginFootprint 28: CAP 2.5*6.3*11.2-H - BK; OriginFootprint 29: CAP 2.5*6.3*11.2-H - GD; OriginFootprint 30: CAP 3.5*8*11.5; OriginFootprint 31: CAP 3.5*8*11.5 - BK; OriginFootprint 32: CAP 3.5*8*11.5 - GD; OriginFootprint 33: CAP 3.5*8*11.5-H; OriginFootprint 34: CAP 3.5*8*11.5-H - BK; OriginFootprint 35: CAP 3.5*8*11.5-H - GD; OriginFootprint 36: CAP 5.0*10*12.5; OriginFootprint 37: CAP 5.0*10*12.5 - BK; OriginFootprint 38: CAP 5.0*10*12.5 - GD; OriginFootprint 39: CAP 5.0*10*12.5-H; OriginFootprint 40: CAP 5.0*10*12.5-H - BK; OriginFootprint 41: CAP 5.0*10*12.5-H - GD; OriginFootprint 42: CAP 5.0*10*16; OriginFootprint 43: CAP 5.0*10*16 - BK; OriginFootprint 44: CAP 5.0*10*16 - GD; OriginFootprint 45: CAP 5.0*10*16-H; OriginFootprint 46: CAP 5.0*10*16-H - BK; OriginFootprint 47: CAP 5.0*10*16-H - GD; OriginFootprint 48: CAP 5.0*10*20; OriginFootprint 49: CAP 5.0*10*20 - BK; OriginFootprint 50: CAP 5.0*10*20 - GD; OriginFootprint 51: CAP 5.0*10*20-H; OriginFootprint 52: CAP 5.0*10*20-H - BK; OriginFootprint 53: CAP 5.0*10*20-H - GD; OriginFootprint 54: CAP 5.0*12.5*20; OriginFootprint 55: CAP 5.0*12.5*20 - BK; OriginFootprint 56: CAP 5.0*12.5*20 - GD; OriginFootprint 57: CAP 5.0*12.5*20-H; OriginFootprint 58: CAP 5.0*12.5*20-H - BK; OriginFootprint 59: CAP 5.0*12.5*20-H - GD; OriginFootprint 60: CAP 5.0*12.5*25; OriginFootprint 61: CAP 5.0*12.5*25 - BK; OriginFootprint 62: CAP 5.0*12.5*25 - GD; OriginFootprint 63: CAP 5.0*12.5*25-H; OriginFootprint 64: CAP 5.0*12.5*25-H - BK; OriginFootprint 65: CAP 5.0*12.5*25-H - GD; OriginFootprint 66: CAP 7.5*16*25; OriginFootprint 67: CAP 7.5*16*25 - BK; OriginFootprint 68: CAP 7.5*16*25 - GD; OriginFootprint 69: CAP 7.5*16*25-H; OriginFootprint 70: CAP 7.5*16*25-H - BK; OriginFootprint 71: CAP 7.5*16*25-H - GD; OriginFootprint 72: CAP 7.5*16*31.5; OriginFootprint 73: CAP 7.5*16*31.5 - BK; OriginFootprint 74: CAP 7.5*16*31.5 - GD; OriginFootprint 75: CAP 7.5*16*31.5-H; OriginFootprint 76: CAP 7.5*16*31.5-H - BK; OriginFootprint 77: CAP 7.5*16*31.5-H - GD; OriginFootprint 78: CAP 7.5*18*35.5; OriginFootprint 79: CAP 7.5*18*35.5 - BK; OriginFootprint 80: CAP 7.5*18*35.5 - GD; OriginFootprint 81: CAP 7.5*18*35.5-H; OriginFootprint 82: CAP 7.5*18*35.5-H - BK; OriginFootprint 83: CAP 7.5*18*35.5-H - GD; OriginFootprint 84: CAP 10*22*31.5; OriginFootprint 85: CAP 10*22*31.5 - BK; OriginFootprint 86: CAP 10*22*31.5 - GD; OriginFootprint 87: CAP 10*22*40; OriginFootprint 88: CAP 10*22*40 - BK; OriginFootprint 89: CAP 10*22*40 - GD; UniqueId: b3046c03e9daf2c0; SymbolName: CE; AddInBom: yes; OriginModelName: CAP 2.5X6.3X11.2; BOM名称: 直插电解电容; 联系售后: https://shop463601444.taobao.com; DesignItemID: CE; LibraryName: 0.1 - 电阻-电容-电感; FootprintName: CAP 2.5*6.3*11.2
footprint CAP 2.5*6.3*11.2
pins: 1 A, 2 K
text: +

## CH340C_1
designator U?, comment CH340C
Device: CH340C_1; UniqueId: ff8ef192d39a962a; AddInBom: yes; DesignItemID: CH340C; LibraryName: CH340CCH340C (1); SymbolName: CH340C; FootprintName: CH340C
footprint CH340C
pins: 1 GND, 2 TXD, 3 RXD, 4 V3, 5 D+, 6 D-, 7 NC., 8 OUT#, 9 CTS#, 10 DSR#, 11 RI#, 12 DCD#, 13 DTR#, 14 RTS#, 15 R232, 16 VCC

## DG201BDY-T1E3
designator U?, comment dg201BDY
Device: DG201BDY-T1E3; UniqueId: 4bb3335060f18692; AddInBom: yes; DesignItemID: DG201BDY-T1E3; LibraryName: 4.1 - 未分类器件; SymbolName: DG201BDY-T1E3; FootprintName: dg201BDY
footprint dg201BDY
pins: 1 IN1, 2 D1, 3 S1, 4 V-, 5 GND, 6 S4, 7 D4, 8 IN4, 9 IN3, 10 D3, 11 S3, 12 NC, 13 V+, 14 S2, 15 D2, 16 IN2

## DG201BDY-T1E3_1
designator U?, comment dg201BDY
Device: DG201BDY-T1E3; UniqueId: ea6c5e45b64ed132; AddInBom: yes; DesignItemID: DG201BDY-T1E3; LibraryName: 4.1 - 未分类器件; SymbolName: DG201BDY-T1E3; FootprintName: dg201BDY
footprint dg201BDY
pins: 1 IN1, 2 D1, 3 S1, 4 V-, 5 GND, 6 S4, 7 D4, 8 IN4, 9 IN3, 10 D3, 11 S3, 12 NC, 13 V+, 14 S2, 15 D2, 16 IN2

## DG201BDY-T1E3_2
designator U?, comment dg201BDY
Device: DG201BDY-T1E3; UniqueId: 6151f2f354ad58a1; AddInBom: yes; DesignItemID: DG201BDY-T1E3; LibraryName: 4.1 - 未分类器件; SymbolName: DG201BDY-T1E3; FootprintName: dg201BDY
footprint dg201BDY
pins: 1 IN1, 2 D1, 3 S1, 4 V-, 5 GND, 6 S4, 7 D4, 8 IN4, 9 IN3, 10 D3, 11 S3, 12 NC, 13 V+, 14 S2, 15 D2, 16 IN2

## DG201BDY-T1E3_3
designator U?, comment dg201BDY
Device: DG201BDY-T1E3; UniqueId: 6e245fde712204fc; AddInBom: yes; DesignItemID: DG201BDY-T1E3; LibraryName: 4.1 - 未分类器件; SymbolName: DG201BDY-T1E3; FootprintName: dg201BDY
footprint dg201BDY
pins: 1 IN1, 2 D1, 3 S1, 4 V-, 5 GND, 6 S4, 7 D4, 8 IN4, 9 IN3, 10 D3, 11 S3, 12 NC, 13 V+, 14 S2, 15 D2, 16 IN2

## DG201BDY-T1E3_4
designator U?, comment dg201BDY
Device: DG201BDY-T1E3; UniqueId: 1bdc0ab44f99f92d; AddInBom: yes; DesignItemID: DG201BDY-T1E3; LibraryName: 4.1 - 未分类器件; SymbolName: DG201BDY-T1E3; FootprintName: dg201BDY
footprint dg201BDY
pins: 1 IN1, 2 D1, 3 S1, 4 V-, 5 GND, 6 S4, 7 D4, 8 IN4, 9 IN3, 10 D3, 11 S3, 12 NC, 13 V+, 14 S2, 15 D2, 16 IN2

## DG201BDY-T1E3_5
designator U?, comment dg201BDY
Device: DG201BDY-T1E3; UniqueId: c69de7c088414df5; AddInBom: yes; DesignItemID: DG201BDY-T1E3; LibraryName: 4.1 - 未分类器件; SymbolName: DG201BDY-T1E3; FootprintName: dg201BDY
footprint dg201BDY
pins: 1 IN1, 2 D1, 3 S1, 4 V-, 5 GND, 6 S4, 7 D4, 8 IN4, 9 IN3, 10 D3, 11 S3, 12 NC, 13 V+, 14 S2, 15 D2, 16 IN2

## DG201BDY-T1E3_6
designator U?, comment dg201BDY
Device: DG201BDY-T1E3; UniqueId: 28995c53ef78d865; AddInBom: yes; DesignItemID: DG201BDY-T1E3; LibraryName: 4.1 - 未分类器件; SymbolName: DG201BDY-T1E3; FootprintName: dg201BDY
footprint dg201BDY
pins: 1 IN1, 2 D1, 3 S1, 4 V-, 5 GND, 6 S4, 7 D4, 8 IN4, 9 IN3, 10 D3, 11 S3, 12 NC, 13 V+, 14 S2, 15 D2, 16 IN2

## DG201BDY-T1E3_7
designator U?, comment dg201BDY
Device: DG201BDY-T1E3; UniqueId: ca4d2b64b6ec8380; AddInBom: yes; DesignItemID: DG201BDY-T1E3; LibraryName: 4.1 - 未分类器件; SymbolName: DG201BDY-T1E3; FootprintName: dg201BDY
footprint dg201BDY
pins: 1 IN1, 2 D1, 3 S1, 4 V-, 5 GND, 6 S4, 7 D4, 8 IN4, 9 IN3, 10 D3, 11 S3, 12 NC, 13 V+, 14 S2, 15 D2, 16 IN2

## Header 2
designator JP?, comment HDR-1X2  (value not drawn)
2P接插件; Device: Header 2; 版权归属: 封装库来自淘宝 ID：黄晶宝石; Origin Footprint: XH2.54-WI-2P; OriginFootprint 2: XH2.54-LI-2P; OriginFootprint 3: HDR2.54-M-LI-2P; OriginFootprint 4: HDR2.54-WI-2P; OriginFootprint 5: HDR2.54-WS-2P; OriginFootprint 6: HDR2.54-Y-LI-2P; OriginFootprint 7: HDR2.54-M-WS-2P; OriginFootprint 8: KF2510-LI-2P; OriginFootprint 9: XH2.54-WS-2P; OriginFootprint 10: XH2.54-LS-2P; OriginFootprint 11: KF2EDGK-2.54-LI-2P; OriginFootprint 12: KF2EDGK-2.54-WI-2P; UniqueId: 4fe8deccf3ecd12b; AddInBom: yes; OriginModelName: HDR2.54-1P; BOM名称: 2P接插件; 联系售后: https://shop463601444.taobao.com; DesignItemID: Header 2; LibraryName: 5.4 - 接插件-脚距2.54 (100mil); SymbolName: Header 2; FootprintName: HDR2.54-LI-2P
footprint HDR2.54-LI-2P
pins: 1, 2

## Header 2_1
designator JP?, comment HDR-1X2  (value not drawn)
2P接插件; Device: Header 2; 版权归属: 封装库来自淘宝 ID：黄晶宝石; Origin Footprint: XH2.54-WI-2P; OriginFootprint 2: XH2.54-LI-2P; OriginFootprint 3: HDR2.54-M-LI-2P; OriginFootprint 4: HDR2.54-WI-2P; OriginFootprint 5: HDR2.54-WS-2P; OriginFootprint 6: HDR2.54-Y-LI-2P; OriginFootprint 7: HDR2.54-M-WS-2P; OriginFootprint 8: KF2510-LI-2P; OriginFootprint 9: XH2.54-WS-2P; OriginFootprint 10: XH2.54-LS-2P; OriginFootprint 11: KF2EDGK-2.54-LI-2P; OriginFootprint 12: KF2EDGK-2.54-WI-2P; UniqueId: 7ff5f6d6ea161ff3; AddInBom: yes; OriginModelName: HDR2.54-1P; BOM名称: 2P接插件; 联系售后: https://shop463601444.taobao.com; DesignItemID: Header 2; LibraryName: 5.4 - 接插件-脚距2.54 (100mil); SymbolName: Header 2; FootprintName: HDR2.54-LI-2P
footprint HDR2.54-LI-2P
pins: 1, 2

## Header 2_1_1
designator JP?, comment HDR-1X2  (value not drawn)
2P接插件; Device: Header 2_1; 版权归属: 封装库来自淘宝 ID：黄晶宝石; Origin Footprint: KF2EDGK5.0-LI-2P; OriginFootprint 2: KF2EDGK5.0-WI-2P; UniqueId: d3f532f2bac10b8c; SymbolName: Header 2; AddInBom: yes; OriginModelName: KF301; BOM名称: 2P接插件; 技术支持，联系售后: https://shop463601444.taobao.com; DesignItemID: Header 2; LibraryName: 6.0 - 接插件-脚距5.0; FootprintName: KF301-5.0-2P
footprint KF301-5.0-2P
pins: 1, 2

## Header 2_2
designator JP?, comment HDR-1X2  (value not drawn)
2P接插件; Device: Header 2; 版权归属: 封装库来自淘宝 ID：黄晶宝石; Origin Footprint: XH2.54-WI-2P; OriginFootprint 2: XH2.54-LI-2P; OriginFootprint 3: HDR2.54-M-LI-2P; OriginFootprint 4: HDR2.54-WI-2P; OriginFootprint 5: HDR2.54-WS-2P; OriginFootprint 6: HDR2.54-Y-LI-2P; OriginFootprint 7: HDR2.54-M-WS-2P; OriginFootprint 8: KF2510-LI-2P; OriginFootprint 9: XH2.54-WS-2P; OriginFootprint 10: XH2.54-LS-2P; OriginFootprint 11: KF2EDGK-2.54-LI-2P; OriginFootprint 12: KF2EDGK-2.54-WI-2P; UniqueId: d84cd54a2cd93ea0; AddInBom: yes; OriginModelName: HDR2.54-1P; BOM名称: 2P接插件; 联系售后: https://shop463601444.taobao.com; DesignItemID: Header 2; LibraryName: 5.4 - 接插件-脚距2.54 (100mil); SymbolName: Header 2; FootprintName: HDR2.54-LI-2P
footprint HDR2.54-LI-2P
pins: 1, 2

## Header 2_3
designator JP?, comment HDR-1X2  (value not drawn)
2P接插件; Device: Header 2; 版权归属: 封装库来自淘宝 ID：黄晶宝石; Origin Footprint: XH2.54-WI-2P; OriginFootprint 2: XH2.54-LI-2P; OriginFootprint 3: HDR2.54-M-LI-2P; OriginFootprint 4: HDR2.54-WI-2P; OriginFootprint 5: HDR2.54-WS-2P; OriginFootprint 6: HDR2.54-Y-LI-2P; OriginFootprint 7: HDR2.54-M-WS-2P; OriginFootprint 8: KF2510-LI-2P; OriginFootprint 9: XH2.54-WS-2P; OriginFootprint 10: XH2.54-LS-2P; OriginFootprint 11: KF2EDGK-2.54-LI-2P; OriginFootprint 12: KF2EDGK-2.54-WI-2P; UniqueId: 4577e3d3da87c365; AddInBom: yes; OriginModelName: HDR2.54-1P; BOM名称: 2P接插件; 联系售后: https://shop463601444.taobao.com; DesignItemID: Header 2; LibraryName: 5.4 - 接插件-脚距2.54 (100mil); SymbolName: Header 2; FootprintName: HDR2.54-LI-2P
footprint HDR2.54-LI-2P
pins: 1, 2

## Header 2_4
designator JP?, comment HDR-1X2  (value not drawn)
2P接插件; Device: Header 2; 版权归属: 封装库来自淘宝 ID：黄晶宝石; Origin Footprint: XH2.54-WI-2P; OriginFootprint 2: XH2.54-LI-2P; OriginFootprint 3: HDR2.54-M-LI-2P; OriginFootprint 4: HDR2.54-WI-2P; OriginFootprint 5: HDR2.54-WS-2P; OriginFootprint 6: HDR2.54-Y-LI-2P; OriginFootprint 7: HDR2.54-M-WS-2P; OriginFootprint 8: KF2510-LI-2P; OriginFootprint 9: XH2.54-WS-2P; OriginFootprint 10: XH2.54-LS-2P; OriginFootprint 11: KF2EDGK-2.54-LI-2P; OriginFootprint 12: KF2EDGK-2.54-WI-2P; UniqueId: 12cb931c49908c91; AddInBom: yes; OriginModelName: HDR2.54-1P; BOM名称: 2P接插件; 联系售后: https://shop463601444.taobao.com; DesignItemID: Header 2; LibraryName: 5.4 - 接插件-脚距2.54 (100mil); SymbolName: Header 2; FootprintName: HDR2.54-LI-2P
footprint HDR2.54-LI-2P
pins: 1, 2

## Header 2_5
designator JP?, comment HDR-1X2  (value not drawn)
2P接插件; Device: Header 2; 版权归属: 封装库来自淘宝 ID：黄晶宝石; Origin Footprint: XH2.54-WI-2P; OriginFootprint 2: XH2.54-LI-2P; OriginFootprint 3: HDR2.54-M-LI-2P; OriginFootprint 4: HDR2.54-WI-2P; OriginFootprint 5: HDR2.54-WS-2P; OriginFootprint 6: HDR2.54-Y-LI-2P; OriginFootprint 7: HDR2.54-M-WS-2P; OriginFootprint 8: KF2510-LI-2P; OriginFootprint 9: XH2.54-WS-2P; OriginFootprint 10: XH2.54-LS-2P; OriginFootprint 11: KF2EDGK-2.54-LI-2P; OriginFootprint 12: KF2EDGK-2.54-WI-2P; UniqueId: 8401f236ce86758e; AddInBom: yes; OriginModelName: HDR2.54-1P; BOM名称: 2P接插件; 联系售后: https://shop463601444.taobao.com; DesignItemID: Header 2; LibraryName: 5.4 - 接插件-脚距2.54 (100mil); SymbolName: Header 2; FootprintName: HDR2.54-LI-2P
footprint HDR2.54-LI-2P
pins: 1, 2

## Header 2_6
designator JP?, comment HDR-1X2  (value not drawn)
2P接插件; Device: Header 2; 版权归属: 封装库来自淘宝 ID：黄晶宝石; Origin Footprint: XH2.54-WI-2P; OriginFootprint 2: XH2.54-LI-2P; OriginFootprint 3: HDR2.54-M-LI-2P; OriginFootprint 4: HDR2.54-WI-2P; OriginFootprint 5: HDR2.54-WS-2P; OriginFootprint 6: HDR2.54-Y-LI-2P; OriginFootprint 7: HDR2.54-M-WS-2P; OriginFootprint 8: KF2510-LI-2P; OriginFootprint 9: XH2.54-WS-2P; OriginFootprint 10: XH2.54-LS-2P; OriginFootprint 11: KF2EDGK-2.54-LI-2P; OriginFootprint 12: KF2EDGK-2.54-WI-2P; UniqueId: 2c2198ed19c983b6; AddInBom: yes; OriginModelName: HDR2.54-1P; BOM名称: 2P接插件; 联系售后: https://shop463601444.taobao.com; DesignItemID: Header 2; LibraryName: 5.4 - 接插件-脚距2.54 (100mil); SymbolName: Header 2; FootprintName: HDR2.54-LI-2P
footprint HDR2.54-LI-2P
pins: 1, 2

## Header 2_7
designator JP?, comment HDR-1X2  (value not drawn)
2P接插件; Device: Header 2; 版权归属: 封装库来自淘宝 ID：黄晶宝石; Origin Footprint: XH2.54-WI-2P; OriginFootprint 2: XH2.54-LI-2P; OriginFootprint 3: HDR2.54-M-LI-2P; OriginFootprint 4: HDR2.54-WI-2P; OriginFootprint 5: HDR2.54-WS-2P; OriginFootprint 6: HDR2.54-Y-LI-2P; OriginFootprint 7: HDR2.54-M-WS-2P; OriginFootprint 8: KF2510-LI-2P; OriginFootprint 9: XH2.54-WS-2P; OriginFootprint 10: XH2.54-LS-2P; OriginFootprint 11: KF2EDGK-2.54-LI-2P; OriginFootprint 12: KF2EDGK-2.54-WI-2P; UniqueId: 1e4a53fbbd604e66; AddInBom: yes; OriginModelName: HDR2.54-1P; BOM名称: 2P接插件; 联系售后: https://shop463601444.taobao.com; DesignItemID: Header 2; LibraryName: 5.4 - 接插件-脚距2.54 (100mil); SymbolName: Header 2; FootprintName: HDR2.54-LI-2P
footprint HDR2.54-LI-2P
pins: 1, 2

## Header 2_8
designator JP?, comment HDR-1X2  (value not drawn)
2P接插件; Device: Header 2; 版权归属: 封装库来自淘宝 ID：黄晶宝石; Origin Footprint: XH2.54-WI-2P; OriginFootprint 2: XH2.54-LI-2P; OriginFootprint 3: HDR2.54-M-LI-2P; OriginFootprint 4: HDR2.54-WI-2P; OriginFootprint 5: HDR2.54-WS-2P; OriginFootprint 6: HDR2.54-Y-LI-2P; OriginFootprint 7: HDR2.54-M-WS-2P; OriginFootprint 8: KF2510-LI-2P; OriginFootprint 9: XH2.54-WS-2P; OriginFootprint 10: XH2.54-LS-2P; OriginFootprint 11: KF2EDGK-2.54-LI-2P; OriginFootprint 12: KF2EDGK-2.54-WI-2P; UniqueId: c76a900f0ccf0344; AddInBom: yes; OriginModelName: HDR2.54-1P; BOM名称: 2P接插件; 联系售后: https://shop463601444.taobao.com; DesignItemID: Header 2; LibraryName: 5.4 - 接插件-脚距2.54 (100mil); SymbolName: Header 2; FootprintName: HDR2.54-LI-2P
footprint HDR2.54-LI-2P
pins: 1, 2

## Header 2_9
designator JP?, comment HDR-1X2  (value not drawn)
2P接插件; Device: Header 2; 版权归属: 封装库来自淘宝 ID：黄晶宝石; Origin Footprint: XH2.54-WI-2P; OriginFootprint 2: XH2.54-LI-2P; OriginFootprint 3: HDR2.54-M-LI-2P; OriginFootprint 4: HDR2.54-WI-2P; OriginFootprint 5: HDR2.54-WS-2P; OriginFootprint 6: HDR2.54-Y-LI-2P; OriginFootprint 7: HDR2.54-M-WS-2P; OriginFootprint 8: KF2510-LI-2P; OriginFootprint 9: XH2.54-WS-2P; OriginFootprint 10: XH2.54-LS-2P; OriginFootprint 11: KF2EDGK-2.54-LI-2P; OriginFootprint 12: KF2EDGK-2.54-WI-2P; UniqueId: 81515d3ba89c45d7; AddInBom: yes; OriginModelName: HDR2.54-1P; BOM名称: 2P接插件; 联系售后: https://shop463601444.taobao.com; DesignItemID: Header 2; LibraryName: 5.4 - 接插件-脚距2.54 (100mil); SymbolName: Header 2; FootprintName: HDR2.54-LI-2P
footprint HDR2.54-LI-2P
pins: 1, 2

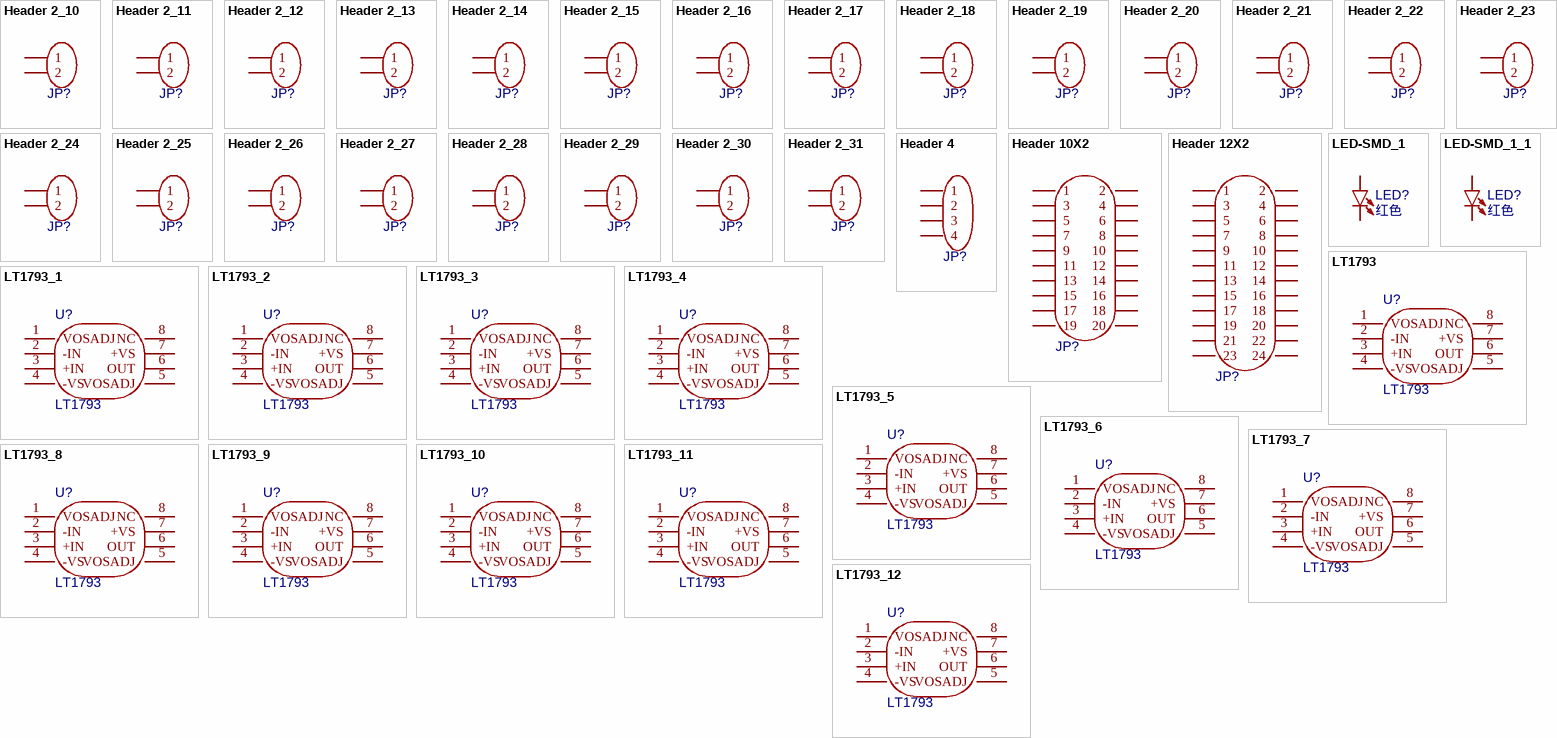
[diagram p4: symbols Header 2_10 to LT1793_12]

## Header 2_10
designator JP?, comment HDR-1X2  (value not drawn)
2P接插件; Device: Header 2; 版权归属: 封装库来自淘宝 ID：黄晶宝石; Origin Footprint: XH2.54-WI-2P; OriginFootprint 2: XH2.54-LI-2P; OriginFootprint 3: HDR2.54-M-LI-2P; OriginFootprint 4: HDR2.54-WI-2P; OriginFootprint 5: HDR2.54-WS-2P; OriginFootprint 6: HDR2.54-Y-LI-2P; OriginFootprint 7: HDR2.54-M-WS-2P; OriginFootprint 8: KF2510-LI-2P; OriginFootprint 9: XH2.54-WS-2P; OriginFootprint 10: XH2.54-LS-2P; OriginFootprint 11: KF2EDGK-2.54-LI-2P; OriginFootprint 12: KF2EDGK-2.54-WI-2P; UniqueId: 2a3f0cfc6900396e; AddInBom: yes; OriginModelName: HDR2.54-1P; BOM名称: 2P接插件; 联系售后: https://shop463601444.taobao.com; DesignItemID: Header 2; LibraryName: 5.4 - 接插件-脚距2.54 (100mil); SymbolName: Header 2; FootprintName: HDR2.54-LI-2P
footprint HDR2.54-LI-2P
pins: 1, 2

## Header 2_11
designator JP?, comment HDR-1X2  (value not drawn)
2P接插件; Device: Header 2; 版权归属: 封装库来自淘宝 ID：黄晶宝石; Origin Footprint: XH2.54-WI-2P; OriginFootprint 2: XH2.54-LI-2P; OriginFootprint 3: HDR2.54-M-LI-2P; OriginFootprint 4: HDR2.54-WI-2P; OriginFootprint 5: HDR2.54-WS-2P; OriginFootprint 6: HDR2.54-Y-LI-2P; OriginFootprint 7: HDR2.54-M-WS-2P; OriginFootprint 8: KF2510-LI-2P; OriginFootprint 9: XH2.54-WS-2P; OriginFootprint 10: XH2.54-LS-2P; OriginFootprint 11: KF2EDGK-2.54-LI-2P; OriginFootprint 12: KF2EDGK-2.54-WI-2P; UniqueId: 6910556eac3a76a2; AddInBom: yes; OriginModelName: HDR2.54-1P; BOM名称: 2P接插件; 联系售后: https://shop463601444.taobao.com; DesignItemID: Header 2; LibraryName: 5.4 - 接插件-脚距2.54 (100mil); SymbolName: Header 2; FootprintName: HDR2.54-LI-2P
footprint HDR2.54-LI-2P
pins: 1, 2

## Header 2_12
designator JP?, comment HDR-1X2  (value not drawn)
2P接插件; Device: Header 2; 版权归属: 封装库来自淘宝 ID：黄晶宝石; Origin Footprint: XH2.54-WI-2P; OriginFootprint 2: XH2.54-LI-2P; OriginFootprint 3: HDR2.54-M-LI-2P; OriginFootprint 4: HDR2.54-WI-2P; OriginFootprint 5: HDR2.54-WS-2P; OriginFootprint 6: HDR2.54-Y-LI-2P; OriginFootprint 7: HDR2.54-M-WS-2P; OriginFootprint 8: KF2510-LI-2P; OriginFootprint 9: XH2.54-WS-2P; OriginFootprint 10: XH2.54-LS-2P; OriginFootprint 11: KF2EDGK-2.54-LI-2P; OriginFootprint 12: KF2EDGK-2.54-WI-2P; UniqueId: 3883b53b87c5b88a; AddInBom: yes; OriginModelName: HDR2.54-1P; BOM名称: 2P接插件; 联系售后: https://shop463601444.taobao.com; DesignItemID: Header 2; LibraryName: 5.4 - 接插件-脚距2.54 (100mil); SymbolName: Header 2; FootprintName: HDR2.54-LI-2P
footprint HDR2.54-LI-2P
pins: 1, 2

## Header 2_13
designator JP?, comment HDR-1X2  (value not drawn)
2P接插件; Device: Header 2; 版权归属: 封装库来自淘宝 ID：黄晶宝石; Origin Footprint: XH2.54-WI-2P; OriginFootprint 2: XH2.54-LI-2P; OriginFootprint 3: HDR2.54-M-LI-2P; OriginFootprint 4: HDR2.54-WI-2P; OriginFootprint 5: HDR2.54-WS-2P; OriginFootprint 6: HDR2.54-Y-LI-2P; OriginFootprint 7: HDR2.54-M-WS-2P; OriginFootprint 8: KF2510-LI-2P; OriginFootprint 9: XH2.54-WS-2P; OriginFootprint 10: XH2.54-LS-2P; OriginFootprint 11: KF2EDGK-2.54-LI-2P; OriginFootprint 12: KF2EDGK-2.54-WI-2P; UniqueId: 0a06460673946c5c; AddInBom: yes; OriginModelName: HDR2.54-1P; BOM名称: 2P接插件; 联系售后: https://shop463601444.taobao.com; DesignItemID: Header 2; LibraryName: 5.4 - 接插件-脚距2.54 (100mil); SymbolName: Header 2; FootprintName: HDR2.54-LI-2P
footprint HDR2.54-LI-2P
pins: 1, 2